# Altium footprint library MyLibrary.PcbLib: 43 footprints (part 2 of 3)
Each footprint in its own frame and in the unit in brackets; x right, y up, seen from the top. Pads: shape width x height; smd on the part's side, far side on the other; paste and mask are expansions set on the pad; w line width, h text height; cw(c..) or ccw(c..) is an arc to the next point about the centre after c.
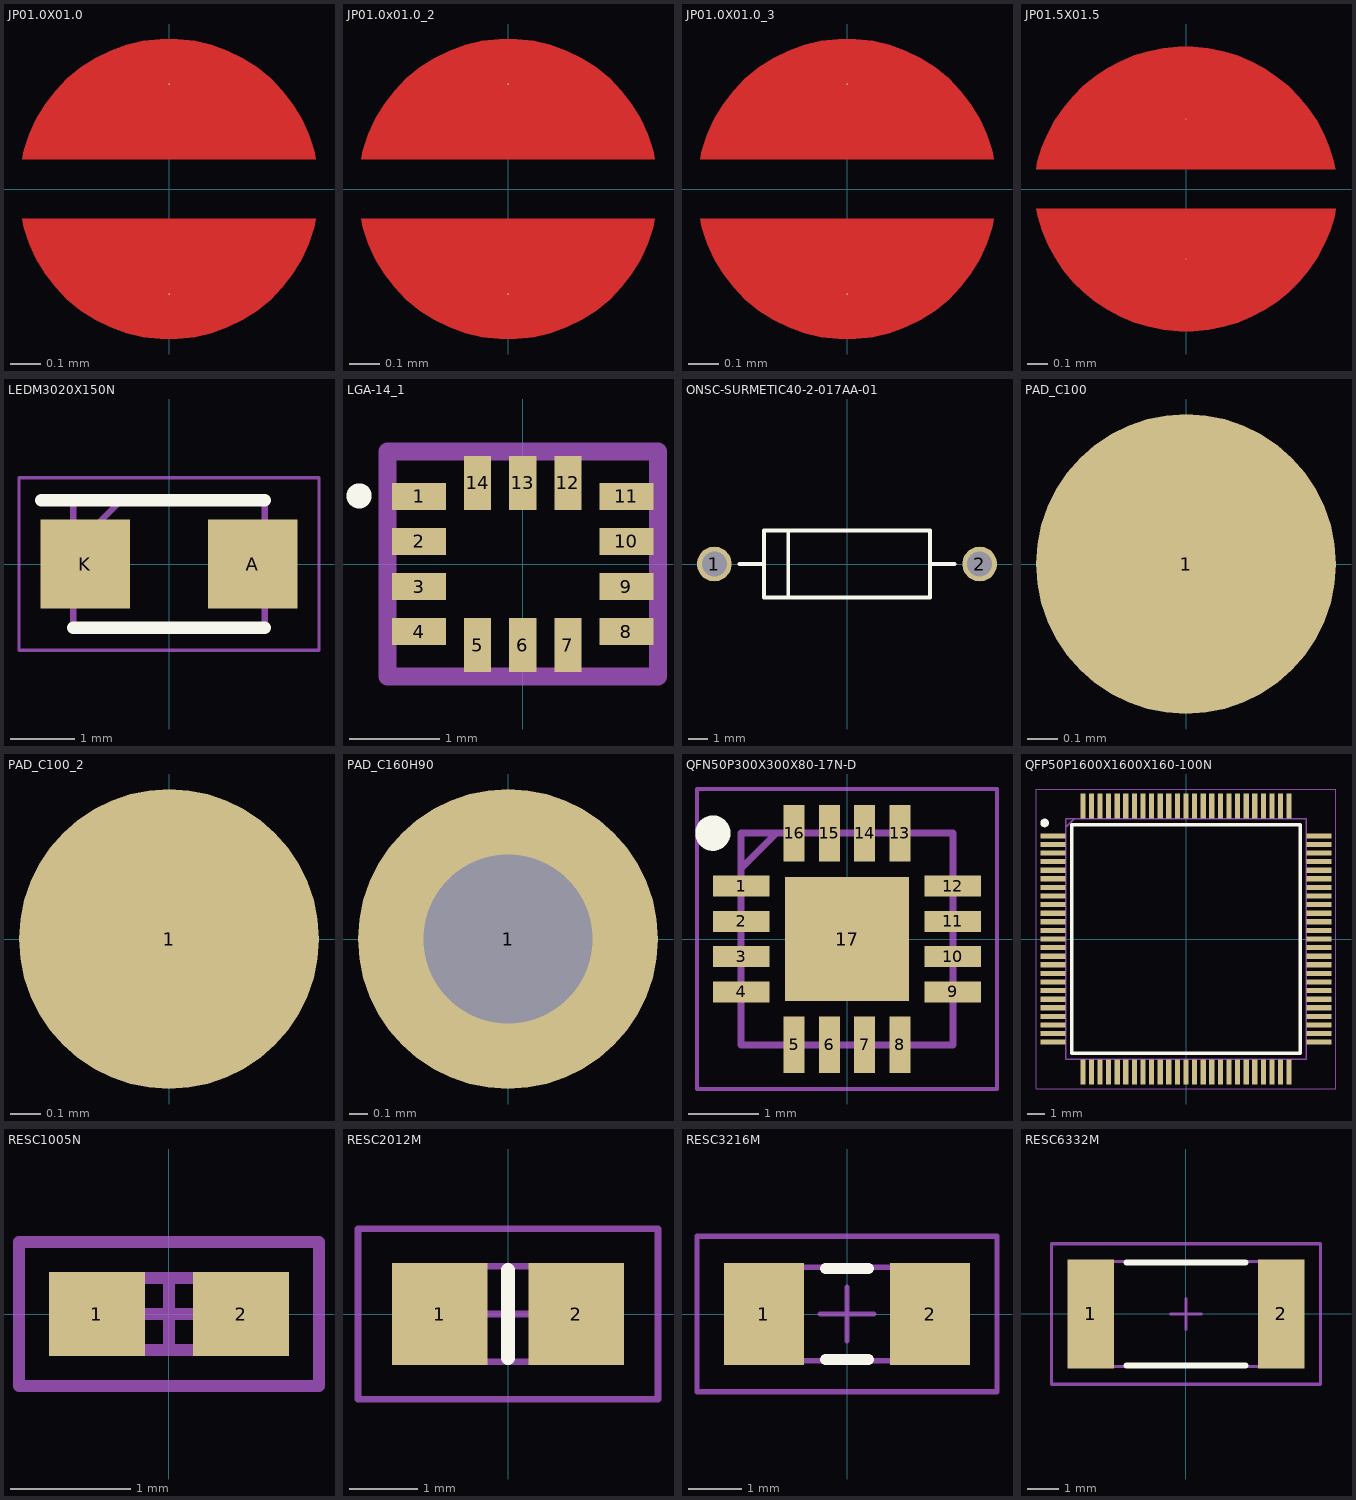
[diagram p1: the footprints below, top view; thin cyan lines are the x and y axes]

## JP01.0X01.0 [mm] "Solder Jumper 01.0 x 01.0 mm Ball"
pads (2):
  round 0.005 smd paste+0 mask+0: 1(0,0.35) 2(0,-0.35)
Top Layer:
  region: -0.49,0.1 -0.484,0.128 -0.466,0.182 -0.443,0.234 -0.413,0.283 -0.378,0.328 -0.338,0.369 -0.294,0.405 -0.246,0.436 -0.195,0.461 -0.141,0.481 -0.085,0.493 -0.029,0.5 0.029,0.5 0.085,0.493 0.141,0.481 0.195,0.461 0.246,0.436 0.294,0.405 0.338,0.369 0.378,0.328 0.413,0.283 0.443,0.234 0.466,0.182 0.484,0.128 0.49,0.1
  region: 0.49,-0.1 0.484,-0.128 0.466,-0.182 0.443,-0.234 0.413,-0.283 0.378,-0.328 0.338,-0.369 0.294,-0.405 0.246,-0.436 0.195,-0.461 0.141,-0.481 0.085,-0.493 0.029,-0.5 -0.029,-0.5 -0.085,-0.493 -0.141,-0.481 -0.195,-0.461 -0.246,-0.436 -0.294,-0.405 -0.338,-0.369 -0.378,-0.328 -0.413,-0.283 -0.443,-0.234 -0.466,-0.182 -0.484,-0.128 -0.49,-0.1
Top Solder:
  region: 0,-0.5 -0.025,-0.5 -0.073,-0.495 -0.122,-0.486 -0.169,-0.471 -0.214,-0.453 -0.257,-0.429 -0.298,-0.402 -0.336,-0.371 -0.371,-0.336 -0.402,-0.298 -0.429,-0.257 -0.453,-0.214 -0.471,-0.169 -0.486,-0.122 -0.495,-0.073 -0.5,-0.025 -0.5,0 -0.5,0.025 -0.495,0.073 -0.486,0.122 -0.471,0.169 -0.453,0.214 -0.429,0.257 -0.402,0.298 -0.371,0.336 -0.336,0.371 -0.298,0.402 -0.257,0.429 -0.214,0.453 -0.169,0.471 -0.122,0.486 -0.073,0.495 -0.025,0.5 0,0.5 0.025,0.5 0.073,0.495 0.122,0.486 0.169,0.471 0.214,0.453 0.257,0.429 0.298,0.402 0.336,0.371 0.371,0.336 0.402,0.298 0.429,0.257 0.453,0.214 0.471,0.169 0.486,0.122 0.495,0.073 0.5,0.025 0.5,0 0.5,-0.025 0.495,-0.073 0.486,-0.122 0.471,-0.169 0.453,-0.214 0.429,-0.257 0.402,-0.298 0.371,-0.336 0.336,-0.371 0.298,-0.402 0.257,-0.429 0.214,-0.453 0.169,-0.471 0.122,-0.486 0.073,-0.495 0.025,-0.5

## JP01.0x01.0_2 [mm]
pads (2):
  round 0.005 smd paste+0 mask+0: 1(0,0.35) 2(0,-0.35)
Top Layer:
  region: 0.49,-0.1 0.484,-0.128 0.466,-0.182 0.443,-0.234 0.413,-0.283 0.378,-0.328 0.338,-0.369 0.294,-0.405 0.246,-0.436 0.195,-0.461 0.141,-0.481 0.085,-0.493 0.029,-0.5 -0.029,-0.5 -0.085,-0.493 -0.141,-0.481 -0.195,-0.461 -0.246,-0.436 -0.294,-0.405 -0.338,-0.369 -0.378,-0.328 -0.413,-0.283 -0.443,-0.234 -0.466,-0.182 -0.484,-0.128 -0.49,-0.1
  region: -0.49,0.1 -0.484,0.128 -0.466,0.182 -0.443,0.234 -0.413,0.283 -0.378,0.328 -0.338,0.369 -0.294,0.405 -0.246,0.436 -0.195,0.461 -0.141,0.481 -0.085,0.493 -0.029,0.5 0.029,0.5 0.085,0.493 0.141,0.481 0.195,0.461 0.246,0.436 0.294,0.405 0.338,0.369 0.378,0.328 0.413,0.283 0.443,0.234 0.466,0.182 0.484,0.128 0.49,0.1
Top Solder:
  region: 0,-0.5 -0.025,-0.5 -0.073,-0.495 -0.122,-0.486 -0.169,-0.471 -0.214,-0.453 -0.257,-0.429 -0.298,-0.402 -0.336,-0.371 -0.371,-0.336 -0.402,-0.298 -0.429,-0.257 -0.453,-0.214 -0.471,-0.169 -0.486,-0.122 -0.495,-0.073 -0.5,-0.025 -0.5,0 -0.5,0.025 -0.495,0.073 -0.486,0.122 -0.471,0.169 -0.453,0.214 -0.429,0.257 -0.402,0.298 -0.371,0.336 -0.336,0.371 -0.298,0.402 -0.257,0.429 -0.214,0.453 -0.169,0.471 -0.122,0.486 -0.073,0.495 -0.025,0.5 0,0.5 0.025,0.5 0.073,0.495 0.122,0.486 0.169,0.471 0.214,0.453 0.257,0.429 0.298,0.402 0.336,0.371 0.371,0.336 0.402,0.298 0.429,0.257 0.453,0.214 0.471,0.169 0.486,0.122 0.495,0.073 0.5,0.025 0.5,0 0.5,-0.025 0.495,-0.073 0.486,-0.122 0.471,-0.169 0.453,-0.214 0.429,-0.257 0.402,-0.298 0.371,-0.336 0.336,-0.371 0.298,-0.402 0.257,-0.429 0.214,-0.453 0.169,-0.471 0.122,-0.486 0.073,-0.495 0.025,-0.5

## JP01.0X01.0_3 [mm]
pads (2):
  round 0.005 smd paste+0 mask+0: 1(0,0.35) 2(0,-0.35)
Top Layer:
  region: 0.49,-0.1 0.484,-0.128 0.466,-0.182 0.443,-0.234 0.413,-0.283 0.378,-0.328 0.338,-0.369 0.294,-0.405 0.246,-0.436 0.195,-0.461 0.141,-0.481 0.085,-0.493 0.029,-0.5 -0.029,-0.5 -0.085,-0.493 -0.141,-0.481 -0.195,-0.461 -0.246,-0.436 -0.294,-0.405 -0.338,-0.369 -0.378,-0.328 -0.413,-0.283 -0.443,-0.234 -0.466,-0.182 -0.484,-0.128 -0.49,-0.1
  region: -0.49,0.1 -0.484,0.128 -0.466,0.182 -0.443,0.234 -0.413,0.283 -0.378,0.328 -0.338,0.369 -0.294,0.405 -0.246,0.436 -0.195,0.461 -0.141,0.481 -0.085,0.493 -0.029,0.5 0.029,0.5 0.085,0.493 0.141,0.481 0.195,0.461 0.246,0.436 0.294,0.405 0.338,0.369 0.378,0.328 0.413,0.283 0.443,0.234 0.466,0.182 0.484,0.128 0.49,0.1
Top Solder:
  region: 0,-0.5 -0.025,-0.5 -0.073,-0.495 -0.122,-0.486 -0.169,-0.471 -0.214,-0.453 -0.257,-0.429 -0.298,-0.402 -0.336,-0.371 -0.371,-0.336 -0.402,-0.298 -0.429,-0.257 -0.453,-0.214 -0.471,-0.169 -0.486,-0.122 -0.495,-0.073 -0.5,-0.025 -0.5,0 -0.5,0.025 -0.495,0.073 -0.486,0.122 -0.471,0.169 -0.453,0.214 -0.429,0.257 -0.402,0.298 -0.371,0.336 -0.336,0.371 -0.298,0.402 -0.257,0.429 -0.214,0.453 -0.169,0.471 -0.122,0.486 -0.073,0.495 -0.025,0.5 0,0.5 0.025,0.5 0.073,0.495 0.122,0.486 0.169,0.471 0.214,0.453 0.257,0.429 0.298,0.402 0.336,0.371 0.371,0.336 0.402,0.298 0.429,0.257 0.453,0.214 0.471,0.169 0.486,0.122 0.495,0.073 0.5,0.025 0.5,0 0.5,-0.025 0.495,-0.073 0.486,-0.122 0.471,-0.169 0.453,-0.214 0.429,-0.257 0.402,-0.298 0.371,-0.336 0.336,-0.371 0.298,-0.402 0.257,-0.429 0.214,-0.453 0.169,-0.471 0.122,-0.486 0.073,-0.495 0.025,-0.5

## JP01.5X01.5 [mm] "Solder Jumper 01.5 x 01.5 mm Ball"
pads (2):
  round 0.005 smd: 1(0,0.35) 2(0,-0.35)
Top Layer:
  region: -0.75,0.1 -0.743,0.137 -0.72,0.208 -0.692,0.277 -0.656,0.343 -0.614,0.405 -0.567,0.462 -0.514,0.515 -0.456,0.563 -0.393,0.604 -0.327,0.639 -0.258,0.668 -0.187,0.689 -0.113,0.704 -0.039,0.711 0.036,0.711 0.11,0.704 0.183,0.689 0.255,0.668 0.324,0.639 0.39,0.604 0.452,0.563 0.51,0.515 0.563,0.462 0.611,0.405 0.653,0.343 0.688,0.277 0.717,0.208 0.739,0.137 0.747,0.1 0.75,0.1
  region: 0.75,-0.1 0.743,-0.137 0.72,-0.208 0.691,-0.277 0.656,-0.343 0.614,-0.405 0.566,-0.463 0.513,-0.516 0.455,-0.563 0.393,-0.605 0.327,-0.64 0.258,-0.668 0.186,-0.69 0.113,-0.705 0.038,-0.712 -0.037,-0.712 -0.111,-0.705 -0.185,-0.69 -0.256,-0.668 -0.326,-0.64 -0.392,-0.605 -0.454,-0.563 -0.512,-0.516 -0.565,-0.463 -0.613,-0.405 -0.655,-0.343 -0.69,-0.277 -0.719,-0.208 -0.741,-0.137 -0.749,-0.1 -0.75,-0.1
Top Solder:
  region: 0,-0.74 -0.073,-0.74 -0.216,-0.712 -0.351,-0.656 -0.472,-0.575 -0.575,-0.472 -0.656,-0.351 -0.712,-0.216 -0.74,-0.073 -0.74,0 -0.74,0.073 -0.712,0.216 -0.656,0.351 -0.575,0.472 -0.472,0.575 -0.351,0.656 -0.216,0.712 -0.073,0.74 0,0.74 0.073,0.74 0.216,0.712 0.351,0.656 0.472,0.575 0.575,0.472 0.656,0.351 0.712,0.216 0.74,0.073 0.74,0 0.74,-0.073 0.712,-0.216 0.656,-0.351 0.575,-0.472 0.472,-0.575 0.351,-0.656 0.216,-0.712 0.073,-0.74

## LEDM3020X150N [mm]
pads (2):
  rect 1.4x1.4 smd: A(1.314,0) K(-1.314,0)
Top Overlay:
  lines w0.2: -2,1 1.5,1 ; -1.5,-1 1.5,-1
Mechanical 13:
  lines w0.1: -1.5,0.25 -0.75,1 ; -1.5,-1 1.5,-1 1.5,1 -1.5,1 -1.5,-1
Mechanical 15:
  lines w0.05: -2.35,-1.35 2.35,-1.35 2.35,1.35 -2.35,1.35 -2.35,-1.35
3D body "AA3021LZGSK.stp": height 1.3, standoff 0, extent -1.5,-1 1.5,1

## LGA-14_1 [mm]
pads (14):
  rect 0.6x0.3 smd mask+0.03: 1(-1.15,0.75) 2(-1.15,0.25) 3(-1.15,-0.25) 4(-1.15,-0.75) 8(1.15,-0.75) 9(1.15,-0.25) 10(1.15,0.25) 11(1.15,0.75)
  rect 0.3x0.6 smd mask+0.03: 5(-0.5,-0.9) 6(0,-0.9) 7(0.5,-0.9) 12(0.5,0.9) 13(0,0.9) 14(-0.5,0.9)
Top Overlay:
  circle w0.254: c-1.815,0.756 r0.012
Mechanical 13:
  lines w0.2: -1.5,-1.25 1.5,-1.25 1.5,1.25 -1.5,1.25 -1.5,-1.25
3D body "LSM6DSOXTR.stp": height 0.86, standoff 0, extent -1.62,-1.25 1.38,1.25

## ONSC-SURMETIC40-2-017AA-01 [mm] "AXIAL, 2-Leads, Diameter 3.49mm"
height 3.49
pads (2):
  round 1.8 hole 1.3: 1(-6.887,0) 2(6.887,0)
Top Overlay:
  lines w0.2: -5.587,0 -4.317,0 ; -3.047,-1.745 -3.047,1.745 ; 4.317,0 5.587,0 ; -4.317,-1.745 -4.317,1.745 4.317,1.745 4.317,-1.745 -4.317,-1.745

## PAD_C100 [mm] "PAD Circular 1.00 mm diameter, Past Mask -100"
pads (1):
  round 1 smd paste-1: 1(0,0)

## PAD_C100_2 [mm]
pads (1):
  round 1 smd paste-1: 1(0,0)

## PAD_C160H90 [mm] "PAD Circular Diameter 1.6mm, Hole Circular Diameter 0.9mm (For 2.54 x 2.54 mm spacing)"
pads (1):
  round 1.6 hole 0.9: 1(0,0)

## QFN50P300X300X80-17N-D [mm]
pads (17):
  rect 0.8x0.3 smd mask+0.05: 1(-1.5,0.75) 2(-1.5,0.25) 3(-1.5,-0.25) 4(-1.5,-0.75) 9(1.5,-0.75) 10(1.5,-0.25) 11(1.5,0.25) 12(1.5,0.75)
  rect 0.3x0.8 smd mask+0.05: 5(-0.75,-1.5) 6(-0.25,-1.5) 7(0.25,-1.5) 8(0.75,-1.5) 13(0.75,1.5) 14(0.25,1.5) 15(-0.25,1.5) 16(-0.75,1.5)
  rect 1.75x1.75 smd mask+0: 17(0,0)
Top Overlay:
  circle w0.25: c-1.9,1.5 r0.125
Mechanical 13:
  lines w0.1: -1.5,1 -1,1.5 ; -1.5,-1.5 1.5,-1.5 1.5,1.5 -1.5,1.5 -1.5,-1.5
Mechanical 15:
  lines w0.05: -2.125,-2.125 2.125,-2.125 2.125,2.125 -2.125,2.125 -2.125,-2.125
3D body "AD5141WBCPZ10-RL7.stp": height 0.75, standoff 0, extent -1.5,-1.5 1.5,1.5

## QFP50P1600X1600X160-100N [mm]
pads (100):
  rect 1.475x0.3 smd mask+0.02: 1(-7.738,6) 2(-7.738,5.5) 3(-7.738,5) 4(-7.738,4.5) 5(-7.738,4) 6(-7.738,3.5) 7(-7.738,3) 8(-7.738,2.5) 9(-7.738,2) 10(-7.738,1.5) 11(-7.738,1) 12(-7.738,0.5) 13(-7.738,0) 14(-7.738,-0.5) 15(-7.738,-1) 16(-7.738,-1.5) 17(-7.738,-2) 18(-7.738,-2.5) 19(-7.738,-3) 20(-7.738,-3.5) 21(-7.738,-4) 22(-7.738,-4.5) 23(-7.738,-5) 24(-7.738,-5.5) 25(-7.738,-6) 51(7.738,-6) 52(7.738,-5.5) 53(7.738,-5) 54(7.738,-4.5) 55(7.738,-4) 56(7.738,-3.5) 57(7.738,-3) 58(7.738,-2.5) 59(7.738,-2) 60(7.738,-1.5) 61(7.738,-1) 62(7.738,-0.5) 63(7.738,0) 64(7.738,0.5) 65(7.738,1) 66(7.738,1.5) 67(7.738,2) 68(7.738,2.5) 69(7.738,3) 70(7.738,3.5) 71(7.738,4) 72(7.738,4.5) 73(7.738,5) 74(7.738,5.5) 75(7.738,6)
  rect 0.3x1.475 smd mask+0.02: 26(-6,-7.738) 27(-5.5,-7.738) 28(-5,-7.738) 29(-4.5,-7.738) 30(-4,-7.738) 31(-3.5,-7.738) 32(-3,-7.738) 33(-2.5,-7.738) 34(-2,-7.738) 35(-1.5,-7.738) 36(-1,-7.738) 37(-0.5,-7.738) 38(0,-7.738) 39(0.5,-7.738) 40(1,-7.738) 41(1.5,-7.738) 42(2,-7.738) 43(2.5,-7.738) 44(3,-7.738) 45(3.5,-7.738) 46(4,-7.738) 47(4.5,-7.738) 48(5,-7.738) 49(5.5,-7.738) 50(6,-7.738) 76(6,7.738) 77(5.5,7.738) 78(5,7.738) 79(4.5,7.738) 80(4,7.738) 81(3.5,7.738) 82(3,7.738) 83(2.5,7.738) 84(2,7.738) 85(1.5,7.738) 86(1,7.738) 87(0.5,7.738) 88(0,7.738) 89(-0.5,7.738) 90(-1,7.738) 91(-1.5,7.738) 92(-2,7.738) 93(-2.5,7.738) 94(-3,7.738) 95(-3.5,7.738) 96(-4,7.738) 97(-4.5,7.738) 98(-5,7.738) 99(-5.5,7.738) 100(-6,7.738)
Top Overlay:
  circle w0.25: c-8.225,6.75 r0.125
  lines w0.2: -6.65,-6.65 6.65,-6.65 6.65,6.65 -6.65,6.65 -6.65,-6.65
Mechanical 13:
  lines w0.1: -7,6.5 -6.5,7 ; -7,-7 7,-7 7,7 -7,7 -7,-7
Mechanical 15:
  lines w0.05: -8.725,-8.725 8.725,-8.725 8.725,8.725 -8.725,8.725 -8.725,-8.725
3D body "STM32G473VET6.stp": height 1.6, standoff 0, extent -8,-8 8,8

## RESC1005N [mm]
pads (2):
  rect 0.8x0.7 smd: 1(-0.6,0) 2(0.6,0)
Top 3D Body:
  lines w0.1: -0.55,-0.3 0.55,-0.3 0.55,0.3 -0.55,0.3 -0.55,-0.3
Top Courtyard:
  lines w0.1: -0.3,0 0.3,0 ; 0,-0.3 0,0.3 ; -1.25,-0.6 1.25,-0.6 1.25,0.6 -1.25,0.6 -1.25,-0.6
3D body "RESC1005X40N EIA 0402.step": height 0.4, standoff 0, extent -0.5,-0.25 0.5,0.25

## RESC2012M [mm] "Chip Resistor, Body 2.0x1.3mm, IPC Low Density"
height 0.65
pads (2):
  rect 1.4x1.5 smd: 1(-1,0) 2(1,0)
Top Overlay:
  lines w0.2: 0,-0.65 0,0.65
Top 3D Body:
  lines w0.1: -1.075,-0.7 -1.075,0.7 1.075,0.7 1.075,-0.7 -1.075,-0.7
Top Courtyard:
  lines w0.1: -0.5,0 0.5,0 ; 0,-0.5 0,0.5 ; -2.2,-1.25 -2.2,1.25 2.2,1.25 2.2,-1.25 -2.2,-1.25
3D body: height 0.65, standoff 0, extent -1.075,-0.7 1.075,0.7
3D body "RESC2012X60N EIA 0805.step": height 0.6, standoff 0, extent -1,-0.6 1,0.6

## RESC3216M [mm] "Chip Resistor, Body 3.2x1.6mm, IPC Low Density"
height 0.71
pads (2):
  rect 1.5x1.9 smd: 1(-1.55,0) 2(1.55,0)
Top Overlay:
  lines w0.2: -0.4,-0.85 0.4,-0.85 ; -0.4,0.85 0.4,0.85
Top 3D Body:
  lines w0.1: -1.675,-0.875 1.675,-0.875 1.675,0.875 -1.675,0.875 -1.675,-0.875
Top Courtyard:
  lines w0.1: -0.5,0 0.5,0 ; 0,-0.5 0,0.5 ; -2.8,-1.45 2.8,-1.45 2.8,1.45 -2.8,1.45 -2.8,-1.45
3D body "RESC3216X60N EIA 1206.step": height 0.6, standoff 0, extent -1.6,-0.8 1.6,0.8
3D body: height 0.71, standoff 0, extent -1.675,-0.875 1.675,0.875

## RESC6332M [mm] "Chip Resistor, Body 6.3x3.2mm, IPC Low Density"
height 0.71
pads (2):
  rect 1.5x3.5 smd: 1(-3.05,0) 2(3.05,0)
Top Overlay:
  lines w0.2: -1.9,-1.65 1.9,-1.65 ; -1.9,1.65 1.9,1.65
Mechanical 13:
  lines w0.1: -3.225,-1.675 -3.225,1.675 3.225,1.675 3.225,-1.675 -3.225,-1.675
Mechanical 15:
  lines w0.1: -0.5,0 0.5,0 ; 0,-0.5 0,0.5 ; -4.3,-2.25 -4.3,2.25 4.3,2.25 4.3,-2.25 -4.3,-2.25
3D body: height 0.71, standoff 0, extent -3.225,-1.675 3.225,1.675
3D body "RESC6332X70N EIA 2512.step": height 0.7, standoff 0, extent -3.15,-1.6 3.15,1.6